# Altium footprint library SystemCarrier_Altium.PcbLib: 4 footprints
Each footprint in its own frame and in the unit in brackets; x right, y up, seen from the top. Pads: shape width x height; smd on the part's side, far side on the other; paste and mask are expansions set on the pad; w line width, h text height; cw(c..) or ccw(c..) is an arc to the next point about the centre after c.
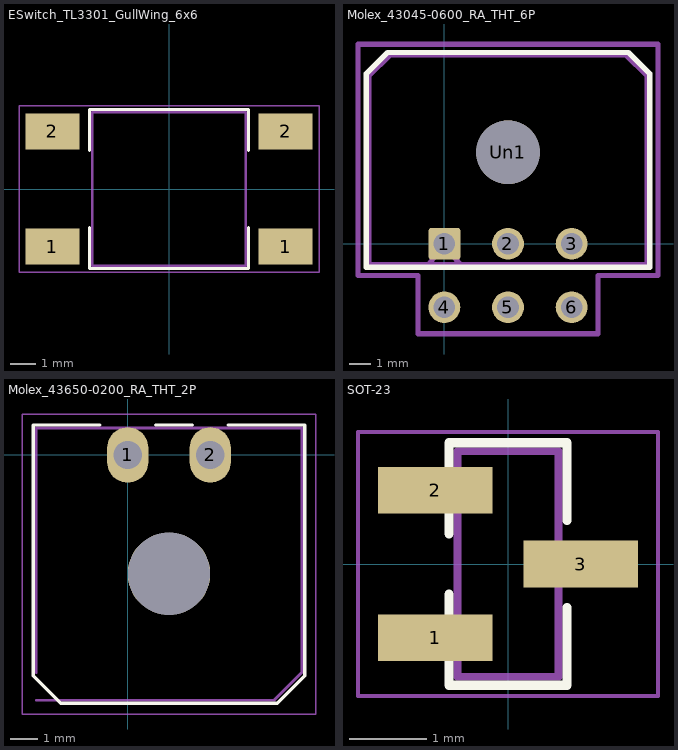
[diagram p0: the footprints below, top view; thin cyan lines are the x and y axes]

## ESwitch_TL3301_GullWing_6x6 [mm] "E-Switch TL3301 series, 6 x 6 mm gull-wing tactile switch"
height 4.3
pads (4):
  rect 2.1x1.4 smd: 1(-4.55,-2.25) 1(4.55,-2.25) 2(-4.55,2.25) 2(4.55,2.25)
F.SilkS:
  lines w0.12: -3.1,-1.5 -3.1,-3.1 3.1,-3.1 3.1,-1.5 ; -3.1,1.5 -3.1,3.1 3.1,3.1 3.1,1.5
Margin:
  lines w0.1: -3,-3 3,-3 3,3 -3,3 -3,-3
Mechanical 15:
  lines w0.05: -5.85,-3.25 5.85,-3.25 5.85,3.25 -5.85,3.25 -5.85,-3.25

## Molex_43045-0600_RA_THT_6P [mm]
pads (7):
  rrect17% 1.5x1.5 hole 1.02: 1(0,0)
  round 1.5 hole 1.02: 2(3,0) 3(6,0) 4(0,-3) 5(3,-3) 6(6,-3)
  round 3 hole 3: Un1(3,4.32)
F.SilkS:
  lines w0.254: -3.685,-1.1 9.685,-1.1 9.685,8.03 8.685,9.03 -2.685,9.03 -3.685,8.03 -3.685,-1.1
F.CrtYd:
  lines w0.254: -4.08,-1.5 -1.25,-1.5 -1.25,-4.25 7.25,-4.25 7.25,-1.5 10.08,-1.5 10.08,9.42 -4.08,9.42 -4.08,-1.5
F.Fab:
  lines w0.254: -0.75,-0.99 0,0 0.75,-0.99 ; -3.575,-0.99 9.575,-0.99 9.575,7.92 8.575,8.92 -2.575,8.92 -3.575,7.92 -3.575,-0.99
  text "'.Designator'" at -1.047,7.38 h1

## Molex_43650-0200_RA_THT_2P [mm] "Molex Micro-Fit 3.0 43650-0200, 2-position right-angle THT"
height 9.65
pads (3):
  oval 1.5x2.02 hole 1.02: 1(0,0) 2(3,0)
  round 3 hole 3 unplated: ""(1.5,-4.32)
F.SilkS:
  lines w0.12: -1.01,1.09 -3.435,1.09 -3.435,-8.03 -2.435,-9.03 5.435,-9.03 6.435,-8.03 6.435,1.09 3.65,1.09 ; 1.01,1.09 2.35,1.09
Margin:
  lines w0.1: -3.325,-8.92 5.325,-8.92 6.325,-7.92 6.325,0.98 -3.325,0.98 -3.325,-7.92
Mechanical 15:
  lines w0.05: -3.83,-9.42 6.83,-9.42 6.83,1.49 -3.83,1.49 -3.83,-9.42

## SOT-23 [mm] "JEDEC TO-236 AB, three-pad SOT-23"
height 1.2
pads (3):
  rect 1.475x0.6 smd: 1(-0.937,-0.95) 2(-0.937,0.95) 3(0.937,0)
F.SilkS:
  lines w0.12: -0.76,-0.39 -0.76,-1.56 0.76,-1.56 0.76,-0.56 ; -0.76,0.39 -0.76,1.56 0.76,1.56 0.76,0.56
Margin:
  lines w0.1: -0.65,-1.45 0.65,-1.45 0.65,1.45 -0.65,1.45 -0.65,-1.45
Mechanical 15:
  lines w0.05: -1.93,-1.7 1.93,-1.7 1.93,1.7 -1.93,1.7 -1.93,-1.7